# Altium schematic symbol library SolderPad.SchLib: 1 symbol
Pins are listed as number, name and electrical type; pins without a type are passive.

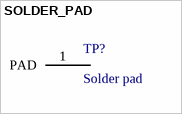
[diagram p0: symbol SOLDER_PAD]

## SOLDER_PAD
designator TP?, comment Solder pad
footprint SOLDER_PAD_THT
pins: 1 PAD